# Altium schematic symbol library ESD5451N-2_TR.SchLib: 1 symbol
Pins are listed as number, name and electrical type; pins without a type are passive.

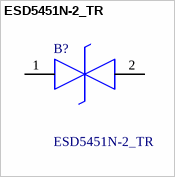
[diagram p0: symbol ESD5451N-2_TR]

## ESD5451N-2_TR
designator B?
1-Line, Bi-directional, Transient Voltage Suppressors; Manufacturer_Name: Will Semiconductor; Manufacturer_Part_Number: ESD5451N-2/TR; Geometry.Height: 0.53mm; Mouser Part Number: *; Mouser Price/Stock: *; Arrow Part Number: *; Arrow Price/Stock: *; Datasheet Link: https://lcsc.com/datasheet/lcsc_datasheet_2410121433_WILLSEMI-Will-Semicon-ESD5451N-2-TR_C239604.pdf
footprint ESD5451N2TR
pins: 1 K1, 2 K2